# Altium footprint library IC.PcbLib: 204 footprints (part 4 of 13)
Each footprint in its own frame and in the unit in brackets; x right, y up, seen from the top. Pads: shape width x height; smd on the part's side, far side on the other; paste and mask are expansions set on the pad; w line width, h text height; cw(c..) or ccw(c..) is an arc to the next point about the centre after c.
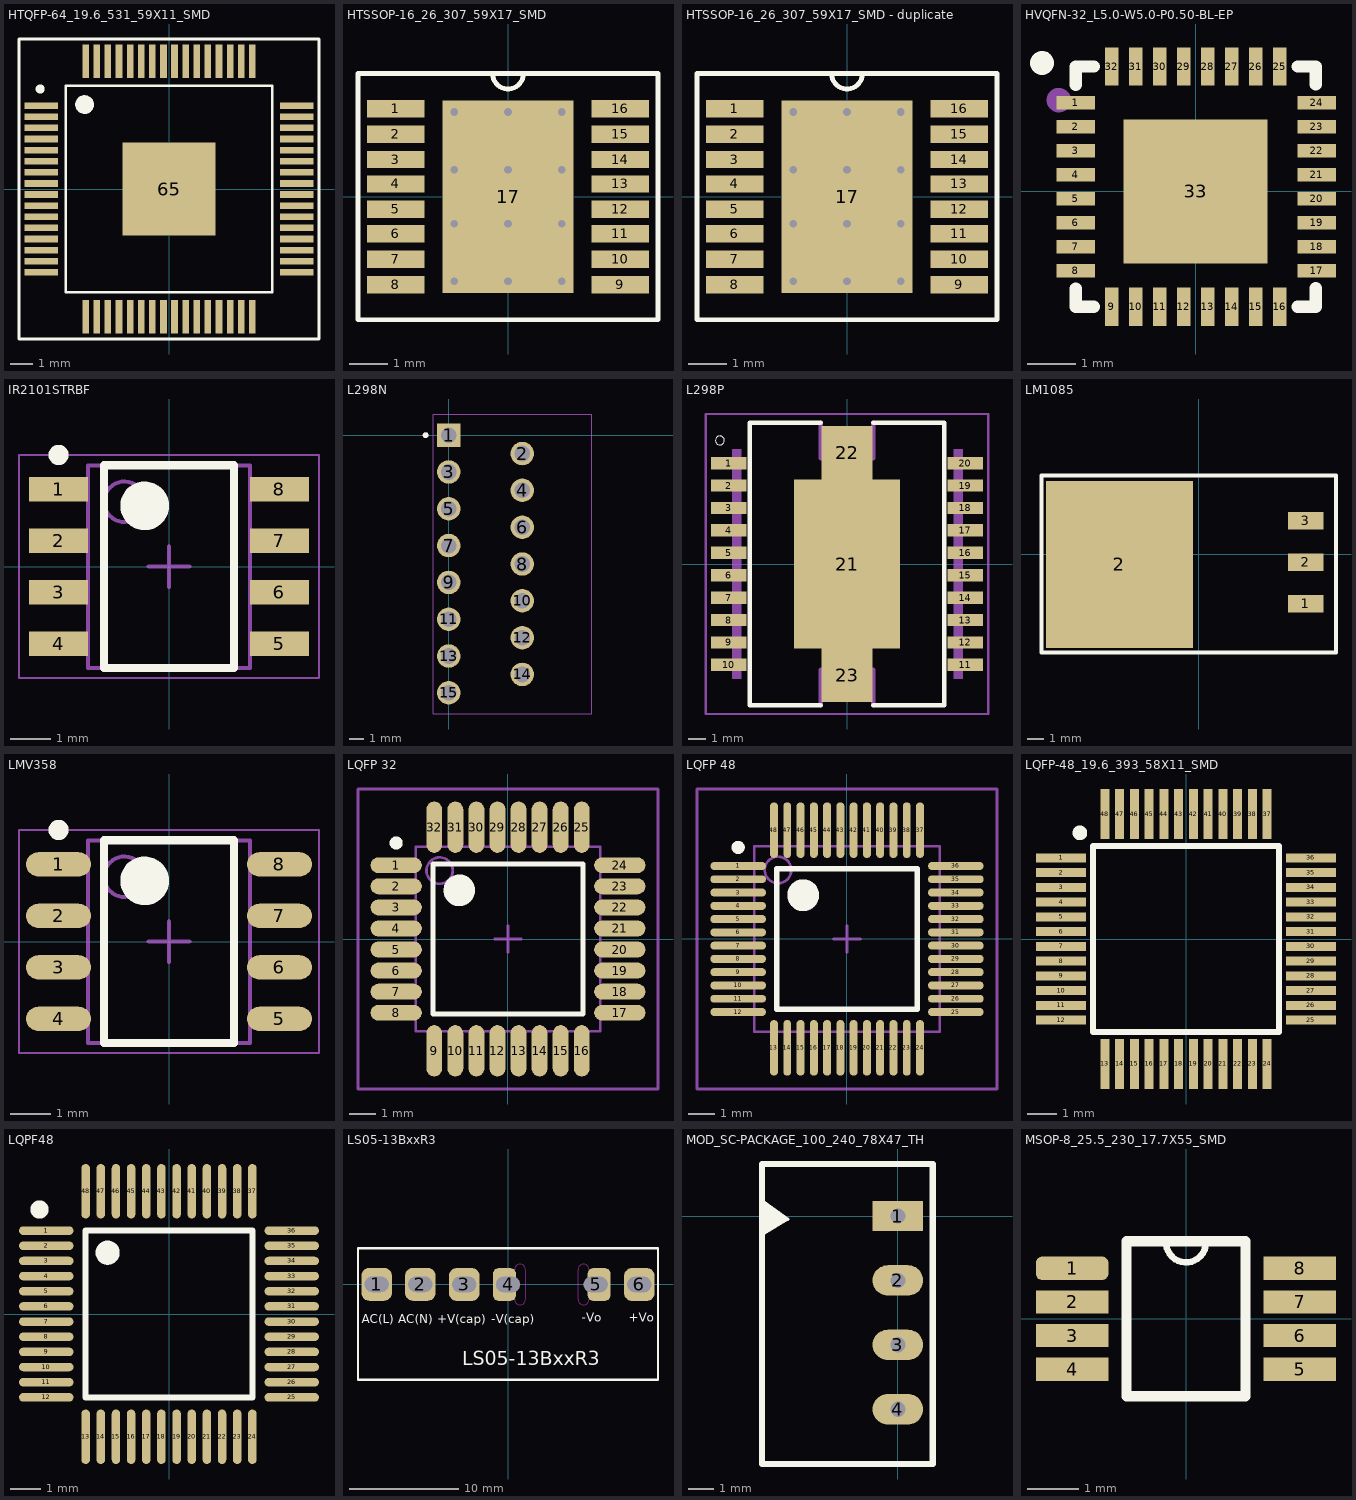
[diagram p3: the footprints below, top view; thin cyan lines are the x and y axes]

## HTQFP-64_19.6_531_59X11_SMD [mm] "HTQFP package"
height 1.2
pads (65):
  rect 1.5x0.3 smd: 1(-5.75,3.75) 2(-5.75,3.25) 3(-5.75,2.75) 4(-5.75,2.25) 5(-5.75,1.75) 6(-5.75,1.25) 7(-5.75,0.75) 8(-5.75,0.25) 9(-5.75,-0.25) 10(-5.75,-0.75) 11(-5.75,-1.25) 12(-5.75,-1.75) 13(-5.75,-2.25) 14(-5.75,-2.75) 15(-5.75,-3.25) 16(-5.75,-3.75) 33(5.75,-3.75) 34(5.75,-3.25) 35(5.75,-2.75) 36(5.75,-2.25) 37(5.75,-1.75) 38(5.75,-1.25) 39(5.75,-0.75) 40(5.75,-0.25) 41(5.75,0.25) 42(5.75,0.75) 43(5.75,1.25) 44(5.75,1.75) 45(5.75,2.25) 46(5.75,2.75) 47(5.75,3.25) 48(5.75,3.75)
  rect 0.3x1.5 smd: 17(-3.75,-5.75) 18(-3.25,-5.75) 19(-2.75,-5.75) 20(-2.25,-5.75) 21(-1.75,-5.75) 22(-1.25,-5.75) 23(-0.75,-5.75) 24(-0.25,-5.75) 25(0.25,-5.75) 26(0.75,-5.75) 27(1.25,-5.75) 28(1.75,-5.75) 29(2.25,-5.75) 30(2.75,-5.75) 31(3.25,-5.75) 32(3.75,-5.75) 49(3.75,5.75) 50(3.25,5.75) 51(2.75,5.75) 52(2.25,5.75) 53(1.75,5.75) 54(1.25,5.75) 55(0.75,5.75) 56(0.25,5.75) 57(-0.25,5.75) 58(-0.75,5.75) 59(-1.25,5.75) 60(-1.75,5.75) 61(-2.25,5.75) 62(-2.75,5.75) 63(-3.25,5.75) 64(-3.75,5.75)
  rect 4.2x4.2 smd: 65(0,0)
Top Overlay:
  circle w0.305: c-5.8,4.5 r0.05
  circle w0.127: c-5.8,4.5 r0.141
  circle w0.305: c-3.8,3.8 r0.141
  circle w0.127: c-3.8,3.8 r0.224
  circle w0.127: c-3.8,3.8 r0.283
  circle w0.127: c-3.8,3.8 r0.283
  circle w0.127: c-3.8,3.8 r0.361
  lines w0.127: -6.75,-6.75 -6.75,6.75 6.75,6.75 6.75,-6.75 -6.75,-6.75 ; -4.65,-4.65 -4.65,4.65 4.65,4.65 4.65,-4.65 -4.65,-4.65

## HTSSOP-16_26_307_59X17_SMD [mm] "16-PowerTSSOP"
height 1.2
pads (17):
  rect 1.5x0.45 smd mask+0.076: 1(-2.921,2.286) 2(-2.921,1.626) 3(-2.921,0.965) 4(-2.921,0.33) 5(-2.921,-0.33) 6(-2.921,-0.965) 7(-2.921,-1.626) 8(-2.921,-2.286) 9(2.921,-2.286) 10(2.921,-1.626) 11(2.921,-0.965) 12(2.921,-0.33) 13(2.921,0.33) 14(2.921,0.965) 15(2.921,1.626) 16(2.921,2.286)
  rect 3.4x5 smd: 17(0,0)
via -1.4,2.2 diameter 0.4 hole 0.2
via 0,2.2 diameter 0.4 hole 0.2
via 1.4,2.2 diameter 0.4 hole 0.2
via 1.4,0.7 diameter 0.4 hole 0.2
via 0,0.7 diameter 0.4 hole 0.2
via -1.4,0.7 diameter 0.4 hole 0.2
via 1.4,-0.7 diameter 0.4 hole 0.2
via 0,-0.7 diameter 0.4 hole 0.2
via -1.4,-0.7 diameter 0.4 hole 0.2
via 1.4,-2.2 diameter 0.4 hole 0.2
via 0,-2.2 diameter 0.4 hole 0.2
via -1.4,-2.2 diameter 0.4 hole 0.2
Top Overlay:
  lines w0.127: -0.4,3.2 ccw(c0,3.2) 0.4,3.2 ; -3.9,-3.2 -3.9,3.2 3.9,3.2 3.9,-3.2 -3.9,-3.2
3D body "User Library-TSSOP-16-1.step": height 1.1, standoff 0, extent -3.2,-2.5 3.2,2.5

## HTSSOP-16_26_307_59X17_SMD - duplicate [mm] "16-PowerTSSOP"
height 1.2
pads (17):
  rect 1.5x0.45 smd mask+0.076: 1(-2.921,2.286) 2(-2.921,1.626) 3(-2.921,0.965) 4(-2.921,0.33) 5(-2.921,-0.33) 6(-2.921,-0.965) 7(-2.921,-1.626) 8(-2.921,-2.286) 9(2.921,-2.286) 10(2.921,-1.626) 11(2.921,-0.965) 12(2.921,-0.33) 13(2.921,0.33) 14(2.921,0.965) 15(2.921,1.626) 16(2.921,2.286)
  rect 3.4x5 smd: 17(0,0)
via -1.4,2.2 diameter 0.4 hole 0.2
via 0,2.2 diameter 0.4 hole 0.2
via 1.4,2.2 diameter 0.4 hole 0.2
via 1.4,0.7 diameter 0.4 hole 0.2
via 0,0.7 diameter 0.4 hole 0.2
via -1.4,0.7 diameter 0.4 hole 0.2
via 1.4,-0.7 diameter 0.4 hole 0.2
via 0,-0.7 diameter 0.4 hole 0.2
via -1.4,-0.7 diameter 0.4 hole 0.2
via 1.4,-2.2 diameter 0.4 hole 0.2
via 0,-2.2 diameter 0.4 hole 0.2
via -1.4,-2.2 diameter 0.4 hole 0.2
Top Overlay:
  lines w0.127: -0.4,3.2 ccw(c0,3.2) 0.4,3.2 ; -3.9,-3.2 -3.9,3.2 3.9,3.2 3.9,-3.2 -3.9,-3.2
3D body "User Library-TSSOP-16-1.step": height 1.1, standoff 0, extent -3.2,-2.5 3.2,2.5

## HVQFN-32_L5.0-W5.0-P0.50-BL-EP [mm]
pads (33):
  rect 0.8x0.28 smd: 1(-2.497,1.85) 2(-2.497,1.35) 3(-2.497,0.85) 4(-2.497,0.35) 5(-2.497,-0.15) 6(-2.497,-0.65) 7(-2.497,-1.15) 8(-2.497,-1.65) 17(2.523,-1.65) 18(2.523,-1.15) 19(2.523,-0.65) 20(2.523,-0.15) 21(2.523,0.35) 22(2.523,0.85) 23(2.523,1.35) 24(2.523,1.85)
  rect 0.28x0.8 smd: 9(-1.747,-2.4) 10(-1.247,-2.4) 11(-0.747,-2.4) 12(-0.247,-2.4) 13(0.253,-2.4) 14(0.753,-2.4) 15(1.253,-2.4) 16(1.753,-2.4) 25(1.753,2.6) 26(1.253,2.6) 27(0.753,2.6) 28(0.253,2.6) 29(-0.247,2.6) 30(-0.747,2.6) 31(-1.247,2.6) 32(-1.747,2.6)
  rect 3x3 smd: 33(0,0)
Top Overlay:
  lines w0.25: -3.073,2.673 cw(c-3.198,2.674) -3.073,2.676
  lines w0.254: -2.497,-2.024 -2.497,-2.4 -2.121,-2.4 ; -2.497,2.219 -2.497,2.6 -2.116,2.6 ; 2.121,-2.4 2.503,-2.4 2.503,-2.019 ; 2.126,2.6 2.503,2.6 2.503,2.224
Top Paste:
  region: 1.443,1.44 1.443,-1.44 -1.437,-1.44 -1.437,1.44
  region: 1.613,2.2 1.893,2.2 1.893,3 1.613,3
  region: 1.113,2.1 1.393,2.1 1.393,2.9 1.113,2.9
  region: 0.613,2.1 0.893,2.1 0.893,2.9 0.613,2.9
  region: 0.113,2.1 0.393,2.1 0.393,2.9 0.113,2.9
  region: -0.387,2.1 -0.107,2.1 -0.107,2.9 -0.387,2.9
  region: -0.888,2.1 -0.608,2.1 -0.608,2.9 -0.888,2.9
  region: -1.388,2.1 -1.107,2.1 -1.107,2.9 -1.388,2.9
  region: -1.887,2.1 -1.607,2.1 -1.607,2.9 -1.887,2.9
  region: 1.612,-2.8 1.892,-2.8 1.892,-2 1.612,-2
  region: 1.113,-2.9 1.393,-2.9 1.393,-2.1 1.113,-2.1
  region: 0.613,-2.9 0.893,-2.9 0.893,-2.1 0.613,-2.1
  region: 0.113,-2.9 0.393,-2.9 0.393,-2.1 0.113,-2.1
  region: -0.387,-2.9 -0.107,-2.9 -0.107,-2.1 -0.387,-2.1
  region: -0.887,-2.9 -0.607,-2.9 -0.607,-2.1 -0.887,-2.1
  region: -1.387,-2.9 -1.107,-2.9 -1.107,-2.1 -1.387,-2.1
  region: -1.888,-2.9 -1.608,-2.9 -1.608,-2.1 -1.888,-2.1
  region: -2.097,-1.79 -2.097,-1.51 -2.897,-1.51 -2.897,-1.79
  region: -2.097,-1.29 -2.097,-1.01 -2.897,-1.01 -2.897,-1.29
  region: -2.097,-0.79 -2.097,-0.51 -2.897,-0.51 -2.897,-0.79
  region: -2.097,-0.29 -2.097,-0.01 -2.897,-0.01 -2.897,-0.29
  region: -2.097,0.21 -2.097,0.49 -2.897,0.49 -2.897,0.21
  region: -2.097,0.71 -2.097,0.99 -2.897,0.99 -2.897,0.71
  region: -2.097,1.21 -2.097,1.49 -2.897,1.49 -2.897,1.21
  region: -2.097,1.71 -2.097,1.99 -2.897,1.99 -2.897,1.71
  region: 2.923,1.71 2.923,1.99 2.123,1.99 2.123,1.71
  region: 2.923,1.21 2.923,1.49 2.123,1.49 2.123,1.21
  region: 2.923,0.71 2.923,0.99 2.123,0.99 2.123,0.71
  region: 2.923,0.21 2.923,0.49 2.123,0.49 2.123,0.21
  region: 2.923,-0.29 2.923,-0.01 2.123,-0.01 2.123,-0.29
  region: 2.923,-0.79 2.923,-0.51 2.123,-0.51 2.123,-0.79
  region: 2.923,-1.29 2.923,-1.01 2.123,-1.01 2.123,-1.29
  region: 2.923,-1.79 2.923,-1.51 2.123,-1.51 2.123,-1.79
Mechanical 15:
  circle w0.254: c-2.847,1.9 r0.127
3D body "QFN-32 V6.stp": height 1.05, standoff 0, extent -2.5,-2.4 2.5,2.6

## IR2101STRBF [mm] "SOIC, 8-Leads, Body 4,90x3,90mm, Pitch 1,27mm, IPC Medium Density"
height 1.35
pads (8):
  rect 1.45x0.6 smd: 1(-2.725,1.905) 2(-2.725,0.635) 3(-2.725,-0.635) 4(-2.725,-1.905) 5(2.725,-1.905) 6(2.725,-0.635) 7(2.725,0.635) 8(2.725,1.905)
Top Overlay:
  circle w0.25: c-2.725,2.755 r0.125
  circle w0.6: c-0.6,1.5 r0.3
  lines w0.2: -1.6,-2.5 -1.6,2.5 1.6,2.5 1.6,-2.5 -1.6,-2.5
Mechanical 13:
  circle w0.1: c-1.1,1.6 r0.5
  lines w0.1: -2,-2.5 -2,2.5 2,2.5 2,-2.5 -2,-2.5
Mechanical 15:
  lines w0.05: -3.7,-2.75 -3.7,2.75 3.7,2.75 3.7,-2.75 -3.7,-2.75
  lines w0.1: -0.5,0 0.5,0 ; 0,-0.5 0,0.5
3D body: height 1.75, standoff 1.35, extent -2,-2.5 2,2.5

## L298N [mm]
pads (15):
  rect 1.62x1.62 hole 1.08: 1(0,0)
  round 1.62 hole 1.08: 2(5.08,-1.27) 3(0,-2.54) 4(5.08,-3.81) 5(0,-5.08) 6(5.08,-6.35) 7(0,-7.62) 8(5.08,-8.89) 9(0,-10.16) 10(5.08,-11.43) 11(0,-12.7) 12(5.08,-13.97) 13(0,-15.24) 14(5.08,-16.51) 15(0,-17.78)
Top Overlay:
  circle w0.2: c-1.59,0 r0.1
Mechanical 13:
  circle w0.2: c-1.59,0 r0.1
Mechanical 15:
  lines w0.05: -1.06,-19.24 9.88,-19.24 9.88,1.46 -1.06,1.46 -1.06,-19.24
3D body "l298n.stp": height 23.85, standoff -1.1, extent -0.238,-18.89 9.652,1.11

## L298P [mm]
pads (23):
  rect 2x0.7 smd: 1(-6.7,5.715) 2(-6.7,4.445) 3(-6.7,3.175) 4(-6.7,1.905) 5(-6.7,0.635) 6(-6.7,-0.635) 7(-6.7,-1.905) 8(-6.7,-3.175) 9(-6.7,-4.445) 10(-6.7,-5.715) 11(6.7,-5.715) 12(6.7,-4.445) 13(6.7,-3.175) 14(6.7,-1.905) 15(6.7,-0.635) 16(6.7,0.635) 17(6.7,1.905) 18(6.7,3.175) 19(6.7,4.445) 20(6.7,5.715)
  rect 6x9.6 smd paste-6: 21(0,0)
  rect 2.9x3.05 smd paste-3: 22(0,6.3) 23(0,-6.3)
Top Overlay:
  circle w0: c-7.2,7 r0.254
  lines w0.254: -1.5,-8 -5.5,-8 -5.5,8 -1.5,8 ; 1.5,-8 5.5,-8 5.5,8 1.5,8
Top Paste:
  region: 1.9,-3.001 -1.901,-3.001 -1.901,3 1.9,3
Mechanical 13:
  circle w0.127: c0,-5 r0.671
  circle w0.127: c0,5 r0.671
  region: 6.553,4.932 6.051,4.932 6.051,6.502 6.553,6.502
  region: 6.553,3.658 6.046,3.658 6.046,5.232 6.553,5.232
  region: 6.553,2.389 6.048,2.389 6.048,3.962 6.553,3.962
  region: 6.553,1.118 6.049,1.118 6.049,2.692 6.553,2.692
  region: 6.553,-0.152 6.048,-0.152 6.048,1.422 6.553,1.422
  region: 6.553,-1.424 6.053,-1.424 6.053,0.152 6.553,0.152
  region: 6.553,-2.695 6.051,-2.695 6.051,-1.118 6.553,-1.118
  region: 6.553,-3.964 6.048,-3.964 6.048,-2.388 6.553,-2.388
  region: 6.553,-5.242 6.056,-5.242 6.056,-3.658 6.553,-3.658
  region: 6.553,-6.507 6.05,-6.507 6.05,-4.928 6.553,-4.928
  region: -5.994,-6.511 -6.511,-6.511 -6.511,-4.928 -5.994,-4.928
  region: -5.994,-5.24 -6.512,-5.24 -6.512,-3.658 -5.994,-3.658
  region: -5.994,-3.964 -6.505,-3.964 -6.505,-2.388 -5.994,-2.388
  region: -5.994,-2.697 -6.513,-2.697 -6.513,-1.118 -5.994,-1.118
  region: -5.994,-1.425 -6.514,-1.425 -6.514,0.152 -5.994,0.152
  region: -5.994,-0.153 -6.515,-0.153 -6.515,1.422 -5.994,1.422
  region: -5.994,1.12 -6.515,1.12 -6.515,2.692 -5.994,2.692
  region: -5.994,2.389 -6.507,2.389 -6.507,3.962 -5.994,3.962
  region: -5.994,3.661 -6.508,3.661 -6.508,5.232 -5.994,5.232
  region: -5.994,4.932 -6.508,4.932 -6.508,6.502 -5.994,6.502
  lines w0.254: -1.5,-8 -1.5,-6 1.5,-6 1.5,-8 ; -1.5,8 -1.5,6 1.5,6 1.5,8
Mechanical 15:
  lines w0.127: -8,-8.5 8,-8.5 8,8.5 -8,8.5 -8,-8.5
3D body "l298p.stp": height 3.14, standoff -0.14, extent -7.112,-7.899 7.074,8.001

## LM1085 [mm]
height 1.27
pads (4):
  rect 2.16x1.07 smd: 1(6.545,-3.039) 2(6.545,-0.499) 3(6.545,2.041)
  rect 9x10.2 smd: 2(-4.836,-0.62)
Top Overlay:
  lines w0.254: -9.6,-6 -9.6,4.8 8.4,4.8 8.4,-6 -9.6,-6
3D body "DDPAK-TO-263-3.step": height 4.44, standoff 0, extent -8.98,-5.555 7.67,4.605

## LMV358 [mm] "SOP, 8-Leads, Body 4,90x3,90mm, Pitch 1,27mm, IPC Medium Density"
height 1.75
pads (8):
  oval 1.6x0.6 smd: 1(-2.725,1.905) 2(-2.725,0.635) 3(-2.725,-0.635) 4(-2.725,-1.905) 5(2.725,-1.905) 6(2.725,-0.635) 7(2.725,0.635) 8(2.725,1.905)
Top Overlay:
  circle w0.6: c-0.6,1.5 r0.3
  circle w0.25: c-2.725,2.755 r0.125
  lines w0.2: -1.6,-2.5 1.6,-2.5 1.6,2.5 -1.6,2.5 -1.6,-2.5
Mechanical 13:
  circle w0.1: c-1.1,1.6 r0.5
  lines w0.1: -2,-2.5 2,-2.5 2,2.5 -2,2.5 -2,-2.5
Mechanical 15:
  lines w0.05: -3.7,-2.75 3.7,-2.75 3.7,2.75 -3.7,2.75 -3.7,-2.75
  lines w0.1: -0.5,0 0.5,0 ; 0,-0.5 0,0.5
3D body: height 1.75, standoff 0.1, extent -2,-2.5 2,2.5

## LQFP 32 [mm] "Thin QFP, 32-Leads, Body 7x7mm, Pitch 0.8mm, IPC Low Density"
height 1.2
pads (32):
  oval 1.95x0.6 smd: 1(-4.25,2.8) 2(-4.25,2) 3(-4.25,1.2) 4(-4.25,0.4) 5(-4.25,-0.4) 6(-4.25,-1.2) 7(-4.25,-2) 8(-4.25,-2.8) 17(4.25,-2.8) 18(4.25,-2) 19(4.25,-1.2) 20(4.25,-0.4) 21(4.25,0.4) 22(4.25,1.2) 23(4.25,2) 24(4.25,2.8)
  oval 0.6x1.95 smd: 9(-2.8,-4.25) 10(-2,-4.25) 11(-1.2,-4.25) 12(-0.4,-4.25) 13(0.4,-4.25) 14(1.2,-4.25) 15(2,-4.25) 16(2.8,-4.25) 25(2.8,4.25) 26(2,4.25) 27(1.2,4.25) 28(0.4,4.25) 29(-0.4,4.25) 30(-1.2,4.25) 31(-2,4.25) 32(-2.8,4.25)
Top Overlay:
  circle w0.6: c-1.85,1.85 r0.3
  circle w0.25: c-4.25,3.65 r0.125
  lines w0.2: -2.85,-2.85 2.85,-2.85 2.85,2.85 -2.85,2.85 -2.85,-2.85
Mechanical 13:
  circle w0.1: c-2.6,2.6 r0.5
  lines w0.1: -3.5,-3.5 3.5,-3.5 3.5,3.5 -3.5,3.5 -3.5,-3.5
Mechanical 15:
  lines w0.1: -0.5,0 0.5,0 ; 0,-0.5 0,0.5 ; -5.7,-5.7 5.7,-5.7 5.7,5.7 -5.7,5.7 -5.7,-5.7
3D body "LQFP32-0_8.step": height 1.61, standoff -0.05, extent -4.494,-4.519 4.545,4.519

## LQFP 48 [mm] "Thin QFP, 48-Leads, Body 7x7mm, Pitch 0.5mm, IPC Low Density"
height 1.6
pads (48):
  oval 2.1x0.3 smd: 1(-4.1,2.75) 2(-4.1,2.25) 3(-4.1,1.75) 4(-4.1,1.25) 5(-4.1,0.75) 6(-4.1,0.25) 7(-4.1,-0.25) 8(-4.1,-0.75) 9(-4.1,-1.25) 10(-4.1,-1.75) 11(-4.1,-2.25) 12(-4.1,-2.75) 25(4.1,-2.75) 26(4.1,-2.25) 27(4.1,-1.75) 28(4.1,-1.25) 29(4.1,-0.75) 30(4.1,-0.25) 31(4.1,0.25) 32(4.1,0.75) 33(4.1,1.25) 34(4.1,1.75) 35(4.1,2.25) 36(4.1,2.75)
  oval 0.3x2.1 smd: 13(-2.75,-4.1) 14(-2.25,-4.1) 15(-1.75,-4.1) 16(-1.25,-4.1) 17(-0.75,-4.1) 18(-0.25,-4.1) 19(0.25,-4.1) 20(0.75,-4.1) 21(1.25,-4.1) 22(1.75,-4.1) 23(2.25,-4.1) 24(2.75,-4.1) 37(2.75,4.1) 38(2.25,4.1) 39(1.75,4.1) 40(1.25,4.1) 41(0.75,4.1) 42(0.25,4.1) 43(-0.25,4.1) 44(-0.75,4.1) 45(-1.25,4.1) 46(-1.75,4.1) 47(-2.25,4.1) 48(-2.75,4.1)
Top Overlay:
  circle w0.6: c-1.65,1.65 r0.3
  circle w0.25: c-4.1,3.45 r0.125
  lines w0.2: -2.65,-2.65 2.65,-2.65 2.65,2.65 -2.65,2.65 -2.65,-2.65
Mechanical 13:
  circle w0.1: c-2.6,2.6 r0.5
  lines w0.1: -3.5,-3.5 3.5,-3.5 3.5,3.5 -3.5,3.5 -3.5,-3.5
Mechanical 15:
  lines w0.1: -0.5,0 0.5,0 ; 0,-0.5 0,0.5 ; -5.65,-5.65 5.65,-5.65 5.65,5.65 -5.65,5.65 -5.65,-5.65
3D body: height 1.6, standoff 0, extent -3.5,-3.5 3.5,3.5

## LQFP-48_19.6_393_58X11_SMD [mm] "48LQFP"
height 1.45
pads (48):
  rect 1.7x0.3 smd mask+0.076: 1(-4.238,2.75) 2(-4.238,2.25) 3(-4.238,1.75) 4(-4.238,1.25) 5(-4.238,0.75) 6(-4.238,0.25) 7(-4.238,-0.25) 8(-4.238,-0.75) 9(-4.238,-1.25) 10(-4.238,-1.75) 11(-4.238,-2.25) 12(-4.238,-2.75) 25(4.238,-2.75) 26(4.238,-2.25) 27(4.238,-1.75) 28(4.238,-1.25) 29(4.238,-0.75) 30(4.238,-0.25) 31(4.238,0.25) 32(4.238,0.75) 33(4.238,1.25) 34(4.238,1.75) 35(4.238,2.25) 36(4.238,2.75)
  rect 0.3x1.7 smd mask+0.076: 13(-2.75,-4.238) 14(-2.25,-4.238) 15(-1.75,-4.238) 16(-1.25,-4.238) 17(-0.75,-4.238) 18(-0.25,-4.238) 19(0.25,-4.238) 20(0.75,-4.238) 21(1.25,-4.238) 22(1.75,-4.238) 23(2.25,-4.238) 24(2.75,-4.238) 37(2.75,4.238) 38(2.25,4.238) 39(1.75,4.238) 40(1.25,4.238) 41(0.75,4.238) 42(0.25,4.238) 43(-0.25,4.238) 44(-0.75,4.238) 45(-1.25,4.238) 46(-1.75,4.238) 47(-2.25,4.238) 48(-2.75,4.238)
Top Overlay:
  circle w0.25: c-3.6,3.6 r0.125
  lines w0.2: -3.15,-3.15 -3.15,3.15 3.15,3.15 3.15,-3.15 -3.15,-3.15
3D body "STM32F103C8T6TR.stp": height 1.7, standoff 0.1, extent -4.5,-4.5 4.5,4.5

## LQPF48 [mm]
height 1.27
pads (48):
  oval 1.8x0.28 smd: 1(-4.05,2.75) 2(-4.05,2.25) 3(-4.05,1.75) 4(-4.05,1.25) 5(-4.05,0.75) 6(-4.05,0.25) 7(-4.05,-0.25) 8(-4.05,-0.75) 9(-4.05,-1.25) 10(-4.05,-1.75) 11(-4.05,-2.25) 12(-4.05,-2.75) 25(4.05,-2.75) 26(4.05,-2.25) 27(4.05,-1.75) 28(4.05,-1.25) 29(4.05,-0.75) 30(4.05,-0.25) 31(4.05,0.25) 32(4.05,0.75) 33(4.05,1.25) 34(4.05,1.75) 35(4.05,2.25) 36(4.05,2.75)
  oval 0.28x1.8 smd: 13(-2.75,-4.05) 14(-2.25,-4.05) 15(-1.75,-4.05) 16(-1.25,-4.05) 17(-0.75,-4.05) 18(-0.25,-4.05) 19(0.25,-4.05) 20(0.75,-4.05) 21(1.25,-4.05) 22(1.75,-4.05) 23(2.25,-4.05) 24(2.75,-4.05) 37(2.75,4.05) 38(2.25,4.05) 39(1.75,4.05) 40(1.25,4.05) 41(0.75,4.05) 42(0.25,4.05) 43(-0.25,4.05) 44(-0.75,4.05) 45(-1.25,4.05) 46(-1.75,4.05) 47(-2.25,4.05) 48(-2.75,4.05)
Top Overlay:
  lines w0.2: -2.75,-2.75 -2.75,2.75 2.75,2.75 2.75,-2.75 -2.75,-2.75
  lines w0.3: -4.125,3.447 cw(c-4.275,3.448) -4.125,3.449
  lines w0.4: -1.826,2.022 cw(c-2.026,2.023) -1.826,2.024

## LS05-13BxxR3 [mm]
pads (6):
  rrect50% 2.8x3 hole 1.4 slot 2.2 at 0 deg: 1(-12,0.005) 2(-8,0.005) 3(-4,-0.005) 6(12,-0.005)
  rrect50% 2.1x3 hole 1.4 slot 2.2 at 0 deg copper offset -0.32,0: 4(0,-0.005)
  rrect50% 2.1x3 hole 1.4 slot 2.2 at 0 deg copper offset 0.32,0: 5(8,-0.005)
Top Overlay:
  lines w0.2: -13.7,-8.7 13.7,-8.7 13.7,3.3 -13.7,3.3 -13.7,-8.7
  text "+Vo" at 11.049,-3.429 h0.8
  text "-Vo" at 6.731,-3.429 h0.8
  text "-V(cap)" at -1.524,-3.556 h0.8
  text "+V(cap)" at -6.477,-3.556 h0.8
  text "AC(N)" at -10.033,-3.556 h0.8
  text "AC(L)" at -13.335,-3.556 h0.8
  text "LS05-13BxxR3" at -4.191,-7.366 h1.27
Keep-Out Layer:
  lines w0.05: 1.599,-1.37 1.599,1.36 ccw(c1.099,1.36) 0.599,1.36 0.6,-1.37 ccw(c1.1,-1.37) 1.6,-1.37 ; 6.4,-1.37 ccw(c6.9,-1.37) 7.4,-1.37 7.4,1.36 ; 6.401,-1.37 6.401,1.36 ; 6.401,1.357 cw(c6.901,1.357) 7.401,1.357
3D body "LS05-13BxxR3.stp": height 15.58, standoff -2.03, extent -13.308,-7.812 13.06,2.738

## MOD_SC-PACKAGE_100_240_78X47_TH [mm] "SC PACK"
height 10
pads (4):
  rect 2x1.2 hole 0.6: 1(0,0)
  oval 2x1.2 hole 0.6: 2(0,-2.54) 3(0,-5.08) 4(0,-7.62)
Top Overlay:
  region: -5.385,0.584 -5.334,0.533 -5.334,-0.66 -4.928,-0.483 -4.369,-0.102
  lines w0.127: -5.319,0.58 -4.343,-0.127 -5.306,-0.69
  lines w0.254: -5.359,-9.779 -5.359,2.052 1.372,2.052 1.372,-9.779 -5.359,-9.779
3D body: height 7.4, standoff 0.1, extent -5.1,-9.5 1.1,1.8

## MSOP-8_25.5_230_17.7X55_SMD [mm] "CASE:MSOP"
height 1.1
pads (8):
  rrect50% 1.4x0.45 smd mask+0.076: 1(-2.2,0.975)
  rect 1.4x0.45 smd mask+0.076: 2(-2.2,0.325) 3(-2.2,-0.325) 4(-2.2,-0.975) 5(2.2,-0.975) 6(2.2,-0.325) 7(2.2,0.325) 8(2.2,0.975)
Top Overlay:
  lines w0.127: -0.382,1.431 ccw(c0,1.473) 0.383,1.446
  lines w0.2: -1.15,-1.5 1.15,-1.5 1.15,1.5 -1.15,1.5 -1.15,-1.5
3D body "MCP6L92T-E_MS.stp": height 1.1, standoff 0, extent -2.45,-1.5 2.45,1.5